# Altium footprint library DIOM5126X250N.PcbLib: 1 footprints
Each footprint in its own frame and in the unit in brackets; x right, y up, seen from the top. Pads: shape width x height; smd on the part's side, far side on the other; paste and mask are expansions set on the pad; w line width, h text height; cw(c..) or ccw(c..) is an arc to the next point about the centre after c.
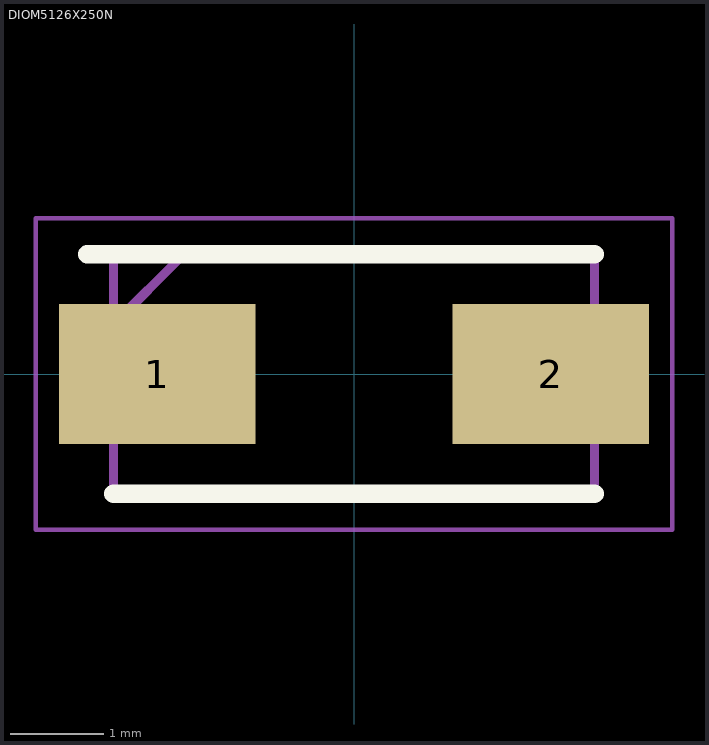
[diagram p0: the footprint, top view; thin cyan lines are the x and y axes]

## DIOM5126X250N [mm]
pads (2):
  rect 2.1x1.5 smd: 1(-2.1,0) 2(2.1,0)
Top Overlay:
  lines w0.2: -2.85,1.28 2.57,1.28 ; -2.57,-1.28 2.57,-1.28
Mechanical 15:
  lines w0.1: -2.57,0.53 -1.82,1.28 ; -2.57,-1.28 2.57,-1.28 2.57,1.28 -2.57,1.28 -2.57,-1.28
Mechanical 20:
  lines w0.05: -3.4,-1.665 3.4,-1.665 3.4,1.665 -3.4,1.665 -3.4,-1.665